# Altium footprint library Master.PcbLib: 178 footprints (part 6 of 12)
Each footprint in its own frame and in the unit in brackets; x right, y up, seen from the top. Pads: shape width x height; smd on the part's side, far side on the other; paste and mask are expansions set on the pad; w line width, h text height; cw(c..) or ccw(c..) is an arc to the next point about the centre after c.
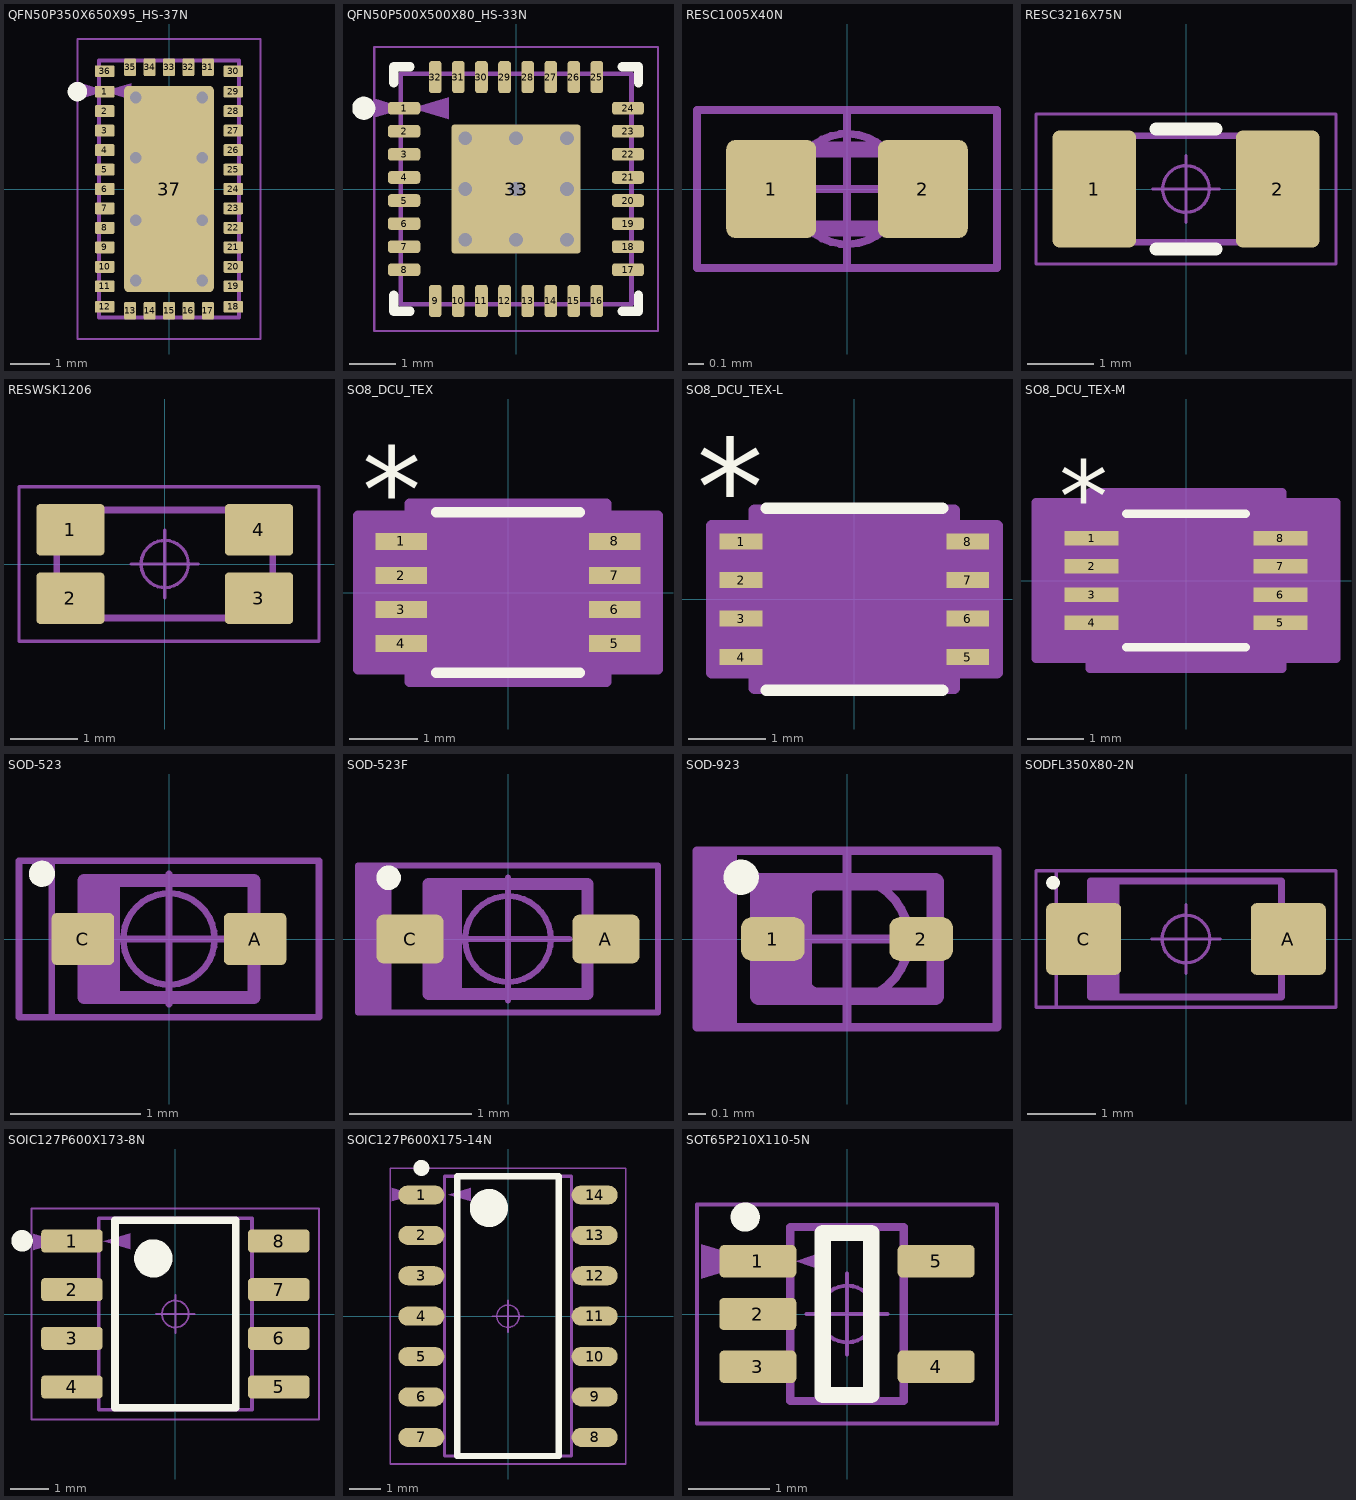
[diagram p5: the footprints below, top view; thin cyan lines are the x and y axes]

## PCBComponent_1 [mm]

## QFN50P350X650X95_HS-37N [mm]
pads (37):
  rrect20% 0.5x0.3 smd paste-0.01: 1(-1.65,2.5) 2(-1.65,2) 3(-1.65,1.5) 4(-1.65,1) 5(-1.65,0.5) 6(-1.65,0) 7(-1.65,-0.5) 8(-1.65,-1) 9(-1.65,-1.5) 10(-1.65,-2) 11(-1.65,-2.5) 12(-1.65,-3.025) 18(1.65,-3.025) 19(1.65,-2.5) 20(1.65,-2) 21(1.65,-1.5) 22(1.65,-1) 23(1.65,-0.5) 24(1.65,0) 25(1.65,0.5) 26(1.65,1) 27(1.65,1.5) 28(1.65,2) 29(1.65,2.5) 30(1.65,3.025) 36(-1.65,3.025)
  rrect20% 0.3x0.45 smd paste-0.01: 13(-1,-3.125) 14(-0.5,-3.125) 15(0,-3.125) 16(0.5,-3.125) 17(1,-3.125) 31(1,3.125) 32(0.5,3.125) 33(0,3.125) 34(-0.5,3.125) 35(-1,3.125)
  rrect10% 2.3x5.3 smd paste-2: 37(0,0)
via -0.85,2.35 diameter 0.6 hole 0.3
via 0.85,2.35 diameter 0.6 hole 0.3
via -0.85,-2.35 diameter 0.6 hole 0.3
via 0.85,-2.35 diameter 0.6 hole 0.3
via 0.85,0.8 diameter 0.6 hole 0.3
via 0.85,-0.8 diameter 0.6 hole 0.3
via -0.85,0.8 diameter 0.6 hole 0.3
via -0.85,-0.8 diameter 0.6 hole 0.3
Top Overlay:
  circle w0.25: c-2.35,2.5 r0.125
Top Paste:
  rectangle: -0.6,-2.35 0.6,2.35
Top Component Outline:
  region: -2.305,2.306 -1.595,2.518 -2.305,2.732
  lines w0.05: -2.35,-3.85 2.35,-3.85 2.35,3.85 -2.35,3.85 -2.35,-3.85
Top 3D Body:
  lines w0.001: -1.801,-3.301 1.801,-3.301 1.801,3.301 -1.801,3.301 -1.801,-3.301
Top Component Center:
  circle w0.05: c0,0 r0.35
  lines w0.05: -0.5,0 0.5,0 ; 0,-0.5 0,0.5
Top Dimensions:
  region: -0.97,2.719 -1.68,2.507 -0.97,2.293
  lines w0.1: -1.8,-3.3 -1.8,3.3 1.8,3.3 1.8,-3.3 -1.8,-3.3
Top Assembly:
  text ".Designator" at 0.17,-1.689 h0.75
3D body "QFN50P350X650X95_HS-37N.step": height 0.95, standoff 0, extent -1.801,-3.301 1.801,3.301

## QFN50P500X500X80_HS-33N [mm] "QFN, 32-Leads, Body 5.00x5.00mm, Pitch 0.50mm, Thermal Pad 3.50x3.50mm, IPC Medium Density"
height 0.8
pads (33):
  rrect50% 0.7x0.275 smd: 1(-2.425,1.75)
  rrect50% 0.7x0.275 smd mask+0.095: 2(-2.425,1.25) 3(-2.425,0.75) 4(-2.425,0.25) 5(-2.425,-0.25) 6(-2.425,-0.75) 7(-2.425,-1.25) 8(-2.425,-1.75) 17(2.425,-1.75) 18(2.425,-1.25) 19(2.425,-0.75) 20(2.425,-0.25) 21(2.425,0.25) 22(2.425,0.75) 23(2.425,1.25) 24(2.425,1.75)
  rrect50% 0.275x0.7 smd mask+0.095: 9(-1.75,-2.425) 10(-1.25,-2.425) 11(-0.75,-2.425) 12(-0.25,-2.425) 13(0.25,-2.425) 14(0.75,-2.425) 15(1.25,-2.425) 16(1.75,-2.425) 25(1.75,2.425) 26(1.25,2.425) 27(0.75,2.425) 28(0.25,2.425) 29(-0.25,2.425) 30(-0.75,2.425) 31(-1.25,2.425) 32(-1.75,2.425)
  rrect5% 2.8x2.8 smd paste-10: 33(0,0)
via 1.1,-1.1 diameter 0.6 hole 0.3
via 0,-1.1 diameter 0.6 hole 0.3
via -1.1,-1.1 diameter 0.6 hole 0.3
via 1.1,0 diameter 0.6 hole 0.3
via 0,0 diameter 0.6 hole 0.3
via -1.1,0 diameter 0.6 hole 0.3
via 1.1,1.1 diameter 0.6 hole 0.3
via 0,1.1 diameter 0.6 hole 0.3
via -1.1,1.1 diameter 0.6 hole 0.3
Top Overlay:
  circle w0.25: c-3.3,1.75 r0.125
  lines w0.2: -2.65,-2.3 -2.65,-2.65 -2.3,-2.65 ; -2.65,2.3 -2.65,2.65 -2.3,2.65 ; 2.3,-2.65 2.65,-2.65 2.65,-2.3 ; 2.3,2.65 2.65,2.65 2.65,2.3
Top Paste:
  region: -0.817,-0.1 -0.836,-0.142 -0.891,-0.216 -0.966,-0.269 -1.054,-0.296 -1.1,-0.3 -1.1,-0.8 -1.041,-0.806 -0.933,-0.851 -0.851,-0.933 -0.806,-1.041 -0.8,-1.1 -0.3,-1.1 -0.296,-1.054 -0.269,-0.966 -0.216,-0.891 -0.142,-0.836 -0.1,-0.817 -0.1,-0.283 -0.131,-0.27 -0.187,-0.234 -0.234,-0.187 -0.27,-0.131 -0.283,-0.1
  region: -1.1,-0.3 -1.325,-0.3 -1.325,-0.8 -1.1,-0.8
  region: -0.8,-1.1 -0.8,-1.325 -0.3,-1.325 -0.3,-1.1
  region: 0.1,-0.817 0.142,-0.836 0.216,-0.891 0.269,-0.966 0.296,-1.054 0.3,-1.1 0.8,-1.1 0.806,-1.041 0.851,-0.933 0.933,-0.851 1.041,-0.806 1.1,-0.8 1.1,-0.3 1.054,-0.296 0.966,-0.269 0.891,-0.216 0.836,-0.142 0.817,-0.1 0.283,-0.1 0.27,-0.131 0.234,-0.187 0.187,-0.234 0.131,-0.27 0.1,-0.283
  region: 0.3,-1.1 0.3,-1.325 0.8,-1.325 0.8,-1.1
  region: 1.1,-0.8 1.325,-0.8 1.325,-0.3 1.1,-0.3
  region: 0.817,0.1 0.836,0.142 0.891,0.216 0.966,0.269 1.054,0.296 1.1,0.3 1.1,0.8 1.041,0.806 0.933,0.851 0.851,0.933 0.806,1.041 0.8,1.1 0.3,1.1 0.296,1.054 0.269,0.966 0.216,0.891 0.142,0.836 0.1,0.817 0.1,0.283 0.131,0.27 0.187,0.234 0.234,0.187 0.27,0.131 0.283,0.1
  region: 1.1,0.3 1.325,0.3 1.325,0.8 1.1,0.8
  region: 0.8,1.1 0.8,1.325 0.3,1.325 0.3,1.1
  region: -0.1,0.817 -0.142,0.836 -0.216,0.891 -0.269,0.966 -0.296,1.054 -0.3,1.1 -0.8,1.1 -0.806,1.041 -0.851,0.933 -0.933,0.851 -1.041,0.806 -1.1,0.8 -1.1,0.3 -1.054,0.296 -0.966,0.269 -0.891,0.216 -0.836,0.142 -0.817,0.1 -0.283,0.1 -0.27,0.131 -0.234,0.187 -0.187,0.234 -0.131,0.27 -0.1,0.283
  region: -1.1,0.8 -1.325,0.8 -1.325,0.3 -1.1,0.3
  region: -0.3,1.1 -0.3,1.325 -0.8,1.325 -0.8,1.1
Top Component Outline:
  region: -3.087,1.962 -2.388,1.753 -3.087,1.543
  lines w0.05: -3.075,-3.075 3.075,-3.075 3.075,3.075 -3.075,3.075 -3.075,-3.075
Top 3D Body:
  lines w0.01: -2.5,-2.5 -2.5,2.5 2.5,2.5 2.5,-2.5 -2.5,-2.5
Top Component Center:
  circle w0.05: c0,0 r0.35
  lines w0.05: -0.5,0 0.5,0 ; 0,-0.5 0,0.5
Top Dimensions:
  region: -1.464,1.513 -2.264,1.753 -1.464,1.993
  lines w0.1: -2.5,-2.5 2.5,-2.5 2.5,2.5 -2.5,2.5 -2.5,-2.5
Top Assembly:
  text ".Designator" at -1.689,-0.17 h0.75
3D body "TestQFN32.step": height 0.8, standoff 0, extent -2.501,-2.501 2.501,2.501

## RESC1005X40N [mm]
pads (2):
  rrect20% 0.57x0.62 smd: 1(-0.48,0) 2(0.48,0)
Top Component Outline:
  lines w0.05: -0.95,-0.5 0.95,-0.5 0.95,0.5 -0.95,0.5 -0.95,-0.5
Top 3D Body:
  lines w0.001: -0.5,-0.25 0.5,-0.25 0.5,0.25 -0.5,0.25 -0.5,-0.25
Top Component Center:
  circle w0.05: c0,0 r0.35
  lines w0.05: -0.5,0 0.5,0 ; 0,-0.5 0,0.5
Top Dimensions:
  lines w0.1: -0.5,-0.25 0.5,-0.25 0.5,0.25 -0.5,0.25 -0.5,-0.25
Top Assembly:
  text ".Designator" at -1.45,0.8 h0.75
3D body "User Library-R_0402.step": height 0.35, standoff 0, extent -0.5,-0.25 0.5,0.25

## RESC3216X75N [mm]
pads (2):
  rrect15% 1.25x1.75 smd: 1(-1.375,0) 2(1.375,0)
Top Overlay:
  lines w0.2: -0.45,-0.9 0.45,-0.9 ; -0.45,0.9 0.45,0.9
Top Component Outline:
  lines w0.05: -2.25,-1.125 -2.25,1.125 2.25,1.125 2.25,-1.125 -2.25,-1.125
Top 3D Body:
  lines w0.001: -1.6,-0.8 -1.6,0.8 1.6,0.8 1.6,-0.8 -1.6,-0.8
Top Component Center:
  circle w0.05: c0,0 r0.35
  lines w0.05: -0.5,0 0.5,0 ; 0,-0.5 0,0.5
Top Dimensions:
  lines w0.1: -1.6,-0.8 -1.6,0.8 1.6,0.8 1.6,-0.8 -1.6,-0.8
Top Assembly:
  text ".Designator" at -1.55,1.475 h0.75
3D body "User Library-R_1206.STEP": height 0.6, standoff 0, extent -1.6,-0.8 1.6,0.8

## RESWSK1206 [mil]
pads (4):
  rrect15% 39.76x30 smd: 1(-55,20) 2(-55,-20) 3(55,-20) 4(55,20)
Top Component Outline:
  lines w1.97: -85,-45 -85,45 90,45 90,-45 -85,-45
Top 3D Body:
  lines w0.04: -62.98,-31.49 -62.98,31.51 63,31.51 63,-31.49 -62.98,-31.49
Top Component Center:
  circle w1.97: c0,0 r13.78
  lines w1.97: -19.68,0 19.68,0 ; 0,-19.68 0,19.68
Top Dimensions:
  lines w3.94: -62.99,-31.5 -62.99,31.5 62.99,31.5 62.99,-31.5 -62.99,-31.5
Top Assembly:
  text ".Designator" at -59.06,56.1 h29.53
3D body "WSK1206.stp": height 25, standoff 0, extent -62.98,-31.49 63,31.51

## SO8_DCU_TEX [mil]
pads (8):
  rect 29.78x10 smd paste+0 mask+0: 1(-61.89,29.54) 2(-61.89,9.85) 3(-61.89,-9.85) 4(-61.89,-29.54) 5(61.89,-29.54) 6(61.89,-9.85) 7(61.89,9.85) 8(61.89,29.54)
Top Overlay:
  lines w6: -41.67,-46.5 41.67,-46.5 ; -41.67,46.5 41.67,46.5
  text ".Designator" at -137.5,-25 h50
  text "*" at -84.39,34.53 h50
Mechanical 13:
  lines w1: -12,41.5 ccw(c0,41.5) 12,41.5 ; -63,-34.53 -63,-24.54 -47,-24.54 -47,-34.53 -63,-34.53 ; -63,-14.85 -63,-4.84 -47,-4.84 -47,-14.85 -63,-14.85 ; -63,4.84 -63,14.85 -47,14.85 -47,4.84 -63,4.84 ; -63,24.54 -63,34.53 -47,34.53 -47,24.54 -63,24.54 ; -47,-41.5 47,-41.5 47,41.5 -47,41.5 -47,-41.5 ; 47,-34.53 47,-24.54 63,-24.54 63,-34.53 47,-34.53 ; 47,-14.85 47,-4.84 63,-4.84 63,-14.85 47,-14.85 ; 47,4.84 47,14.85 63,14.85 63,4.84 47,4.84 ; 47,24.54 47,34.53 63,34.53 63,24.54 47,24.54
  text "*" at -44.5,-11.5 h50
  text ".Designator" at -137.5,-25 h50
Top Courtyard:
  region: -57,-44.53 -86.78,-44.53 -86.78,44.53 -57,44.53 -57,51.5 57,51.5 57,44.53 86.78,44.53 86.78,-44.53 57,-44.53 57,-51.5 -57,-51.5
  lines w6: -86.78,-44.53 -86.78,44.53 -57,44.53 -57,51.5 57,51.5 57,44.53 86.78,44.53 86.78,-44.53 57,-44.53 57,-51.5 -57,-51.5 -57,-44.53 -86.78,-44.53
3D body "SO8_DCU_TEX.step": height 35.12, standoff 0, extent -62.99,-41.5 62.99,41.5

## SO8_DCU_TEX-L [mm]
pads (8):
  rect 0.556x0.204 smd paste+0 mask+0: 1(-1.472,0.75) 2(-1.472,0.25) 3(-1.472,-0.25) 4(-1.472,-0.75) 5(1.472,-0.75) 6(1.472,-0.25) 7(1.472,0.25) 8(1.472,0.75)
Top Overlay:
  lines w0.152: -1.143,-1.181 1.143,-1.181 ; -1.143,1.181 1.143,1.181
  text ".Designator" at -3.492,-0.635 h1.27
  text "*" at -2.044,0.827 h1.27
Mechanical 13:
  lines w0.025: -0.305,1.054 ccw(c0,1.054) 0.305,1.054 ; -1.6,-0.877 -1.6,-0.623 -1.194,-0.623 -1.194,-0.877 -1.6,-0.877 ; -1.6,-0.377 -1.6,-0.123 -1.194,-0.123 -1.194,-0.377 -1.6,-0.377 ; -1.6,0.123 -1.6,0.377 -1.194,0.377 -1.194,0.123 -1.6,0.123 ; -1.6,0.623 -1.6,0.877 -1.194,0.877 -1.194,0.623 -1.6,0.623 ; -1.194,-1.054 1.194,-1.054 1.194,1.054 -1.194,1.054 -1.194,-1.054 ; 1.194,-0.877 1.194,-0.623 1.6,-0.623 1.6,-0.877 1.194,-0.877 ; 1.194,-0.377 1.194,-0.123 1.6,-0.123 1.6,-0.377 1.194,-0.377 ; 1.194,0.123 1.194,0.377 1.6,0.377 1.6,0.123 1.194,0.123 ; 1.194,0.623 1.194,0.877 1.6,0.877 1.6,0.623 1.194,0.623
  text "*" at -1.13,-0.292 h1.27
  text ".Designator" at -3.492,-0.635 h1.27
Top Courtyard:
  region: -1.295,-0.954 -1.852,-0.954 -1.852,0.954 -1.295,0.954 -1.295,1.156 1.295,1.156 1.295,0.954 1.852,0.954 1.852,-0.954 1.295,-0.954 1.295,-1.156 -1.295,-1.156
  lines w0.152: -1.852,-0.954 -1.852,0.954 -1.295,0.954 -1.295,1.156 1.295,1.156 1.295,0.954 1.852,0.954 1.852,-0.954 1.295,-0.954 1.295,-1.156 -1.295,-1.156 -1.295,-0.954 -1.852,-0.954
3D body "SO8_DCU_TEX.step": height 0.89, standoff 0, extent -1.6,-1.054 1.6,1.054

## SO8_DCU_TEX-M [mil]
pads (8):
  rect 37.65x10 smd paste+0 mask+0: 1(-65.83,29.54) 2(-65.83,9.85) 3(-65.83,-9.85) 4(-65.83,-29.54) 5(65.83,-29.54) 6(65.83,-9.85) 7(65.83,9.85) 8(65.83,29.54)
Top Overlay:
  lines w6: -41.67,-46.5 41.67,-46.5 ; -41.67,46.5 41.67,46.5
  text ".Designator" at -137.5,-25 h50
  text "*" at -88.33,34.53 h50
Mechanical 13:
  lines w1: -12,41.5 ccw(c0,41.5) 12,41.5 ; -63,-34.53 -63,-24.54 -47,-24.54 -47,-34.53 -63,-34.53 ; -63,-14.85 -63,-4.84 -47,-4.84 -47,-14.85 -63,-14.85 ; -63,4.84 -63,14.85 -47,14.85 -47,4.84 -63,4.84 ; -63,24.54 -63,34.53 -47,34.53 -47,24.54 -63,24.54 ; -47,-41.5 47,-41.5 47,41.5 -47,41.5 -47,-41.5 ; 47,-34.53 47,-24.54 63,-24.54 63,-34.53 47,-34.53 ; 47,-14.85 47,-4.84 63,-4.84 63,-14.85 47,-14.85 ; 47,4.84 47,14.85 63,14.85 63,4.84 47,4.84 ; 47,24.54 47,34.53 63,34.53 63,24.54 47,24.54
  text "*" at -44.5,-11.5 h50
  text ".Designator" at -137.5,-25 h50
Top Courtyard:
  region: -67,-54.53 -104.65,-54.53 -104.65,54.53 -67,54.53 -67,61.5 67,61.5 67,54.53 104.65,54.53 104.65,-54.53 67,-54.53 67,-61.5 -67,-61.5
  lines w6: -104.65,-54.53 -104.65,54.53 -67,54.53 -67,61.5 67,61.5 67,54.53 104.65,54.53 104.65,-54.53 67,-54.53 67,-61.5 -67,-61.5 -67,-54.53 -104.65,-54.53
3D body "SO8_DCU_TEX.step": height 35.12, standoff 0, extent -62.99,-41.5 62.99,41.5

## SOD-523 [mm]
pads (2):
  rrect20% 0.48x0.4 smd: A(0.66,0) C(-0.66,0)
Top Overlay:
  circle w0.1: c-0.975,0.5 r0.05
Top Component Outline:
  lines w0.05: -0.9,-0.6 -0.9,0.6 ; -1.15,-0.6 -1.15,0.6 1.15,0.6 1.15,-0.6 -1.15,-0.6
Top 3D Body:
  lines w0.001: -0.65,-0.45 0.65,-0.45 0.65,0.45 -0.65,0.45 -0.65,-0.45
Top Component Center:
  circle w0.05: c0,0 r0.35
  lines w0.05: -0.5,0 0.5,0 ; 0,-0.5 0,0.5
Top Dimensions:
  rectangle: -0.65,-0.45 -0.375,0.45
  lines w0.1: -0.65,-0.45 -0.65,0.45 0.65,0.45 0.65,-0.45 -0.65,-0.45
Top Assembly:
  text ".Designator" at -0.975,0.825 h0.75
3D body "SODFL160X70-2N.step": height 0.7, standoff 0, extent -0.8,-0.45 0.8,0.45

## SOD-523F [mm]
pads (2):
  rrect30% 0.55x0.4 smd: A(0.8,0) C(-0.8,0)
Top Overlay:
  circle w0.1: c-0.975,0.5 r0.05
Top Component Outline:
  region: -1.225,0.6 -1.225,-0.6 -0.975,-0.6 -0.975,0.6
  lines w0.05: -0.975,-0.6 -0.975,0.6 ; -1.225,-0.6 1.225,-0.6 1.225,0.6 -1.225,0.6 -1.225,-0.6
Top 3D Body:
  lines w0.001: -0.65,-0.45 -0.65,0.45 0.65,0.45 0.65,-0.45 -0.65,-0.45
Top Component Center:
  circle w0.05: c0,0 r0.35
  lines w0.05: -0.5,0 0.5,0 ; 0,-0.5 0,0.5
Top Dimensions:
  rectangle: -0.65,-0.45 -0.375,0.45
  lines w0.1: -0.65,-0.45 0.65,-0.45 0.65,0.45 -0.65,0.45 -0.65,-0.45
Top Assembly:
  text ".Designator" at -0.975,0.825 h0.75
3D body "SODFL160X70-2N.step": height 0.7, standoff 0, extent -0.8,-0.45 0.8,0.45

## SOD-923 [mm] "SOD-923, 2-Leads, Body 0.60x1.00mm, IPC Medium Density"
height 0.4
pads (2):
  rrect50% 0.36x0.25 smd mask+0.05: 1(-0.42,0) 2(0.42,0)
Top Overlay:
  circle w0.1: c-0.6,0.35 r0.05
Top Component Outline:
  region: -0.85,0.5 -0.625,0.5 -0.625,-0.5 -0.85,-0.5
  lines w0.05: -0.85,-0.5 -0.85,0.5 0.85,0.5 0.85,-0.5 -0.85,-0.5
Top 3D Body:
  lines w0.001: -0.5,-0.325 0.5,-0.325 0.5,0.325 -0.5,0.325 -0.5,-0.325
Top Component Center:
  circle w0.05: c0,0 r0.35
  lines w0.05: -0.5,0 0.5,0 ; 0,-0.5 0,0.5
Top Dimensions:
  region: -0.5,0.325 -0.2,0.325 -0.2,-0.325 -0.5,-0.325
  lines w0.1: -0.5,-0.325 0.5,-0.325 0.5,0.325 -0.5,0.325 -0.5,-0.325
Top Assembly:
  text ".Designator" at -0.3,-0.2 h0.6
3D body "User Library-DIODE_SOD-923.STEP": height 0.43, standoff 0, extent -0.525,-0.325 0.525,0.325

## SODFL350X80-2N [mm]
pads (2):
  rrect15% 1.1x1.05 smd: A(1.5,0) C(-1.5,0)
Top Overlay:
  circle w0.1: c-1.95,0.825 r0.05
Top Component Outline:
  lines w0.05: -1.9,-1 -1.9,1 ; -2.2,-1 2.2,-1 2.2,1 -2.2,1 -2.2,-1
Top 3D Body:
  lines w0.001: -1.4,-0.85 1.4,-0.85 1.4,0.85 -1.4,0.85 -1.4,-0.85
Top Component Center:
  circle w0.05: c0,0 r0.35
  lines w0.05: -0.5,0 0.5,0 ; 0,-0.5 0,0.5
Top Dimensions:
  rectangle: -1.4,-0.85 -0.975,0.85
  lines w0.1: -1.4,-0.85 -1.4,0.85 1.4,0.85 1.4,-0.85 -1.4,-0.85
Top Assembly:
  text ".Designator" at -1.55,1.325 h0.75
3D body "SODFL350X80-2N.step": height 0.8, standoff 0, extent -1.75,-0.85 1.75,0.85

## SOIC127P600X173-8N [mm]
pads (8):
  rrect30% 1.6x0.6 smd: 1(-2.7,1.905) 2(-2.7,0.635) 3(-2.7,-0.635) 4(-2.7,-1.905) 5(2.7,-1.905) 6(2.7,-0.635) 7(2.7,0.635) 8(2.7,1.905)
Top Overlay:
  circle w0.5: c-0.575,1.45 r0.25
  circle w0.4: c-4,1.91 r0.08
  lines w0.2: -1.575,-2.45 1.575,-2.45 1.575,2.45 -1.575,2.45 -1.575,-2.45
Top Component Outline:
  region: -3.705,1.669 -2.995,1.881 -3.705,2.095
  lines w0.05: -3.75,-2.75 3.75,-2.75 3.75,2.75 -3.75,2.75 -3.75,-2.75
Top 3D Body:
  lines w0.001: -2,-2.5 2,-2.5 2,2.5 -2,2.5 -2,-2.5
Top Component Center:
  circle w0.05: c0,0 r0.35
  lines w0.05: -0.5,0 0.5,0 ; 0,-0.5 0,0.5
Top Dimensions:
  region: -1.175,2.113 -1.885,1.9 -1.175,1.687
  lines w0.1: -2,-2.5 2,-2.5 2,2.5 -2,2.5 -2,-2.5
Top Assembly:
  text ".Designator" at -1.475,3 h0.75
3D body "User Library-SOIC127P500X620X175-8.STEP": height 1.75, standoff 0, extent -3.115,-2.5 3.115,2.5

## SOIC127P600X175-14N [mm] "SOIC, 14-Leads, Body 8.65x3.90mm, Pitch 1.27mm, IPC Medium Density"
height 1.75
pads (14):
  oval 1.45x0.6 smd: 1(-2.725,3.81) 2(-2.725,2.54) 3(-2.725,1.27) 4(-2.725,0) 5(-2.725,-1.27) 6(-2.725,-2.54) 7(-2.725,-3.81) 8(2.725,-3.81) 9(2.725,-2.54) 10(2.725,-1.27) 11(2.725,0) 12(2.725,1.27) 13(2.725,2.54) 14(2.725,3.81)
Top Overlay:
  circle w0.6: c-0.6,3.4 r0.3
  circle w0.25: c-2.725,4.66 r0.125
  lines w0.2: -1.6,-4.4 1.6,-4.4 1.6,4.4 -1.6,4.4 -1.6,-4.4
Top Component Outline:
  region: -3.65,3.612 -2.94,3.825 -3.65,4.038
  lines w0.05: -3.7,-4.65 -3.7,4.65 ; -3.7,-4.65 3.7,-4.65 ; -3.7,-4.65 3.7,-4.65 ; -3.7,-4.65 -3.7,4.65 ; -3.7,4.65 3.7,4.65 ; -3.7,4.65 3.7,4.65 ; 3.7,-4.65 3.7,4.65 ; 3.7,-4.65 3.7,4.65
Top 3D Body:
  lines w0.001: -2,-4.4 -2,4.4 2,4.4 2,-4.4 -2,-4.4
Top Component Center:
  circle w0.05: c0,0 r0.35
  lines w0.05: -0.5,0 0.5,0 ; 0,-0.5 0,0.5
Top Dimensions:
  region: -1.165,4.038 -1.875,3.825 -1.165,3.612
  lines w0.1: -2,-4.4 2,-4.4 2,4.4 -2,4.4 -2,-4.4
Top Assembly:
  text ".Designator" at -1.75,4.9 h0.75
3D body "SOIC127P600X175-14N.step": height 1.75, standoff 0, extent -3,-4.4 3,4.4

## SOT65P210X110-5N [mm]
pads (5):
  rrect30% 0.95x0.4 smd: 1(-1.1,0.65) 2(-1.1,0) 3(-1.1,-0.65) 4(1.1,-0.65) 5(1.1,0.65)
Top Overlay:
  circle w0.2: c-1.255,1.195 r0.08
  lines w0.2: -0.3,-1 0.3,-1 0.3,1 -0.3,1 -0.3,-1
Top Component Outline:
  region: -1.8,0.437 -1.09,0.65 -1.8,0.863
  lines w0.05: -1.85,-1.35 1.85,-1.35 1.85,1.35 -1.85,1.35 -1.85,-1.35
Top 3D Body:
  lines w0.001: -0.7,-1.075 0.7,-1.075 0.7,1.075 -0.7,1.075 -0.7,-1.075
Top Component Center:
  circle w0.05: c0,0 r0.35
  lines w0.05: -0.5,0 0.5,0 ; 0,-0.5 0,0.5
Top Dimensions:
  region: -0.635,0.65 -0.254,0.777 -0.254,0.523
  lines w0.1: -0.7,-1.075 0.7,-1.075 0.7,1.075 -0.7,1.075 -0.7,-1.075
Top Assembly:
  text ".Designator" at -1.5,1.625 h0.75
3D body "test-13.step": height 1.1, standoff 0, extent -1.2,-1.075 1.2,1.075